# EAGLE library part EE25-4 (library madhu)
EE25 4 pin transformer
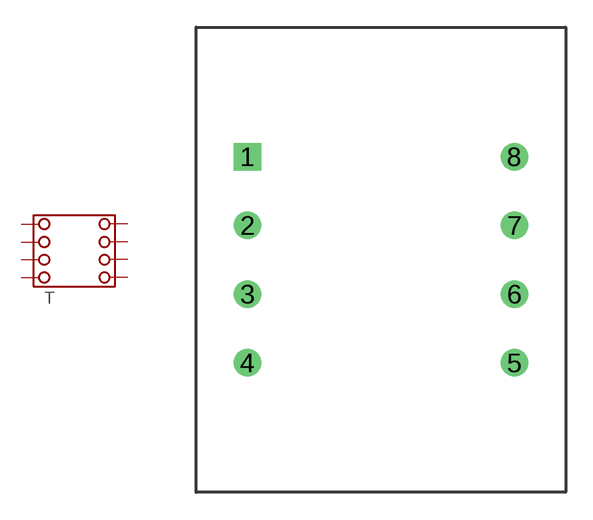
[diagram p53: symbol with the pads of EE25-4; footprint EE25-4]

Designator prefix T

## EE25-4  [EE25-4]
1  1
2  2
3  3
4  4
5  5
6  6
7  7
8  8

## Footprint EE25-4 (pad centres in mm)
EE16 ferrite transformer 4 pin
drill 1.016 square: 1 -7.391,5.715
drill 1.016: 2 -7.391,1.905; 3 -7.391,-1.905; 4 -7.391,-5.715; 5 7.391,-5.715; 6 7.391,-1.905; 7 7.391,1.905; 8 7.391,5.715